# Altium footprint library header-2x4-tht-p2.54.PcbLib: 1 footprints
Each footprint in its own frame and in the unit in brackets; x right, y up, seen from the top. Pads: shape width x height; smd on the part's side, far side on the other; paste and mask are expansions set on the pad; w line width, h text height; cw(c..) or ccw(c..) is an arc to the next point about the centre after c.
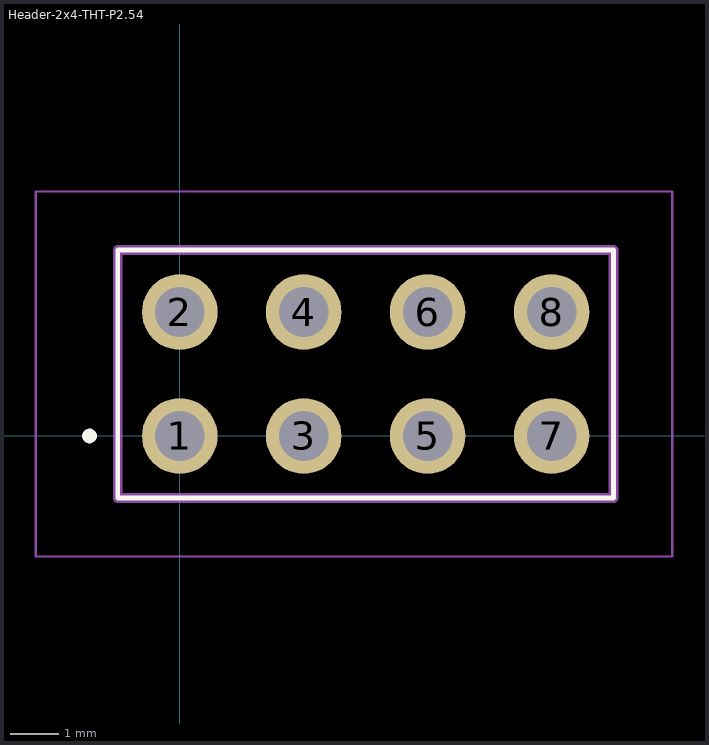
[diagram p0: the footprint, top view; thin cyan lines are the x and y axes]

## Header-2x4-THT-P2.54 [mm] "2x4 vertical male pin header, 2.54 mm pitch, plated through-hole, 8 positions."
pads (8):
  round 1.55 hole 1.02: 1(0,0) 2(0,2.54) 3(2.54,0) 4(2.54,2.54) 5(5.08,0) 6(5.08,2.54) 7(7.62,0) 8(7.62,2.54)
Top Overlay:
  circle w0.2: c-1.85,0 r0.05
  lines w0.1: -1.27,-1.27 8.89,-1.27 8.89,3.81 -1.27,3.81 -1.27,-1.27
Mechanical 13:
  lines w0.2: -1.27,-1.27 8.89,-1.27 8.89,3.81 -1.27,3.81 -1.27,-1.27
Mechanical 15:
  lines w0.05: -2.95,-2.47 10.09,-2.47 10.09,5.01 -2.95,5.01 -2.95,-2.47
3D body "TSW-104-07-G-D.stp": height 8.13, standoff -2.79, extent -1.28,-1.27 8.88,3.81